# Altium integrated library Altium_Fuse.IntLib: 39 symbols
Pins are listed as number, name and electrical type; pins without a type are passive.

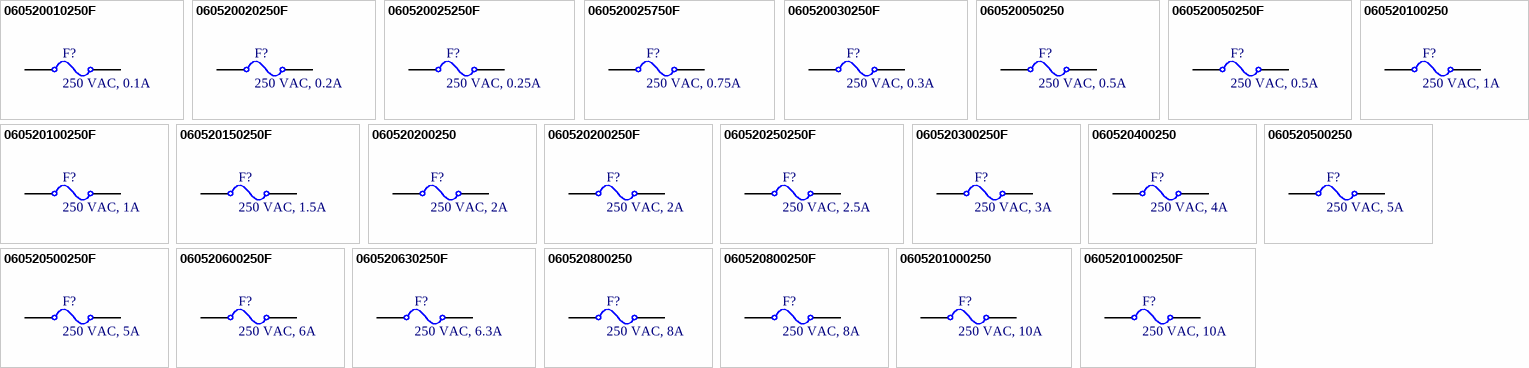
[diagram p0: symbols 060520010250F to 0605201000250F]

## 060520010250F
designator F?, comment 250 VAC, 0.1A
Glass Fuse, Size 0520, 250 VAC, 0.1A, F; Manufacturer: Bel Fuse; Threshold Voltage: 250VAC; Threshold Current: 35A ( 250VAC); Supply 1 Name: Mouser; Supply 1 SN: 530-5ST100-R; Supply 2 Name: Digikey; Supply 2 SN: 507-1238-ND; Supply 3 Name: Thegioiic; Hold Current: 0.1A; Size: 0520; Mounting Technology: Holder / Clip; Fuse speed: F; ComponentLink1Description: Datasheet link; ComponentLink1URL: https://www.belfuse.com/resources/datasheets/circuitprotection/ds-cp-5st-5stp-series.pdf; ComponentLink2Description: Supply 1 URL; ComponentLink2URL: https://www.mouser.vn/ProductDetail/Bel-Fuse/5ST-100-R?qs=MvPYbBWWJysvyCTUIgtvFw%3D%3D; ComponentLink3Description: Supply 2 URL; ComponentLink3URL: https://www.digikey.com/en/products/detail/bel-fuse-inc/5ST-100-R/1009010; ComponentLink4Description: Supply 3 URL; ComponentLink4URL: https://www.thegioiic.com/cau-chi-ong-thuy-tinh-0-1a-5x20mm-toc-do-f; Supply 3 SN: N/A
footprint Fuse_Clip_0520 (Clip Fuse, Size 0520)
pins: 0, 1

## 060520020250F
designator F?, comment 250 VAC, 0.2A
Glass Fuse, Size 0520, 250 VAC, 0.2A, F; Manufacturer: Littelfuse; Threshold Voltage: 250VAC; Threshold Current: 35A ( 250VAC); Supply 1 Name: Mouser; Supply 1 SN: 576-0217.200MXP; Supply 2 Name: Digikey; Supply 2 SN: 507-1263-ND; Supply 3 Name: Thegioiic; Hold Current: 0.2A; Size: 0520; Mounting Technology: Holder / Clip; Fuse speed: F; ComponentLink1Description: Datasheet link; ComponentLink1URL: https://www.littelfuse.com/~/media/electronics/datasheets/fuses/littelfuse_fuse_217_datasheet.pdf.pdf; ComponentLink2Description: Supply 1 URL; ComponentLink2URL: https://www.mouser.vn/ProductDetail/Littelfuse/0217.200MXP?qs=LpXnx4WbYtByvcMiHPFRdQ%3D%3D; ComponentLink3Description: Supply 2 URL; ComponentLink3URL: https://www.digikey.com/en/products/detail/bel-fuse-inc/5MF-1-5-R/1009035; ComponentLink4Description: Supply 3 URL; ComponentLink4URL: https://www.thegioiic.com/cau-chi-ong-thuy-tinh-0-2a-5x20mm-toc-do-f; Supply 3 SN: N/A
footprint Fuse_Clip_0520 (Clip Fuse, Size 0520)
pins: 0, 1

## 060520025250F
designator F?, comment 250 VAC, 0.25A
Glass Fuse, Size 0520, 250 VAC, 0.25A, F; Manufacturer: Littelfuse; Threshold Voltage: 250VAC; Threshold Current: 35A ( 250VAC); Supply 1 Name: Mouser; Supply 1 SN: 576-0217.250MXP; Supply 2 Name: Digikey; Supply 2 SN: F1718-ND; Supply 3 Name: Thegioiic; Hold Current: 0.25A; Size: 0520; Mounting Technology: Holder / Clip; Fuse speed: F; ComponentLink1Description: Datasheet link; ComponentLink1URL: https://www.littelfuse.com/~/media/electronics/datasheets/fuses/littelfuse_fuse_217_datasheet.pdf.pdf; ComponentLink2Description: Supply 1 URL; ComponentLink2URL: https://www.mouser.vn/ProductDetail/Littelfuse/0217.250MXP?qs=KOeOmFnJLTo%252BGMWHwtjXYA%3D%3D; ComponentLink3Description: Supply 2 URL; ComponentLink3URL: https://www.digikey.com/en/products/detail/littelfuse-inc/0217-250MXP/777531?s=N4IgTCBcDaIAxgIwHYB0YCscCyANACiALoC%2BQA; ComponentLink4Description: Supply 3 URL; ComponentLink4URL: https://www.thegioiic.com/cau-chi-ong-thuy-tinh-0-25a-5x20mm-toc-do-f; Supply 3 SN: N/A
footprint Fuse_Clip_0520 (Clip Fuse, Size 0520)
pins: 0, 1

## 060520025750F
designator F?, comment 250 VAC, 0.75A
Glass Fuse, Size 0520, 250 VAC, 0.75A, F; Manufacturer: Bussmann / Eaton; Threshold Voltage: 250VAC; Threshold Current: 35A; Supply 1 Name: Mouser; Supply 1 SN: 504-BK/GMA-750-R; Supply 2 Name: Digikey; Supply 2 SN: 283-2869-ND; Supply 3 Name: Thegioiic; Hold Current: 0.75A; Size: 0520; Mounting Technology: Holder / Clip; Fuse speed: F; ComponentLink1Description: Datasheet link; ComponentLink1URL: https://www.eaton.com/content/dam/eaton/products/electronic-components/resources/data-sheet/eaton-gma-time-delay-glass-tube-fuses-data-sheet.pdf; ComponentLink2Description: Supply 1 URL; ComponentLink2URL: https://www.mouser.vn/ProductDetail/Bussmann-Eaton/BK-GMA-750-R?qs=St27ATL478tI49%252BCTEEZkw%3D%3D; ComponentLink3Description: Supply 2 URL; ComponentLink3URL: https://www.digikey.com/en/products/detail/eaton-electronics-division/BK-GMA-750-R/1023987?s=N4IgTCBcDaIAQCEDSB6A4gWQIIFoDsArAAw4BKIAugL5A; ComponentLink4Description: Supply 3 URL; ComponentLink4URL: https://www.thegioiic.com/cau-chi-ong-thuy-tinh-0-75a-5x20mm-toc-do-f; Supply 3 SN: N/A
footprint Fuse_Clip_0520 (Clip Fuse, Size 0520)
pins: 0, 1

## 060520030250F
designator F?, comment 250 VAC, 0.3A
Glass Fuse, Size 0520, 250 VAC, 0.3A, F; Manufacturer: Littelfuse; Threshold Voltage: 250VAC; Threshold Current: 10kA ( 125VAC); Supply 1 Name: Mouser; Supply 1 SN: 576-0235.300MXP; Supply 2 Name: Digikey; Supply 2 SN: F4717-ND; Supply 3 Name: Thegioiic; Hold Current: 0.3A; Size: 0520; Mounting Technology: Holder / Clip; Fuse speed: F; ComponentLink1Description: Datasheet link; ComponentLink1URL: https://www.littelfuse.com/~/media/electronics/datasheets/fuses/littelfuse_fuse_217_datasheet.pdf.pdf; ComponentLink2Description: Supply 1 URL; ComponentLink2URL: https://www.mouser.vn/ProductDetail/Littelfuse/0235.300MXP?qs=qI%252BDxnNls1%2FlgYUhjxKUBg%3D%3D; ComponentLink3Description: Supply 2 URL; ComponentLink3URL: https://www.digikey.com/en/products/detail/littelfuse-inc/0235-300MXP/778120?s=N4IgTCBcDaIAxgMwFYB0i5wLIA0AKIAugL5A; ComponentLink4Description: Supply 3 URL; ComponentLink4URL: https://www.thegioiic.com/cau-chi-ong-thuy-tinh-0-3a-5x20mm-toc-do-f; Supply 3 SN: N/A
footprint Fuse_Clip_0520 (Clip Fuse, Size 0520)
pins: 0, 1

## 060520050250
designator F?, comment 250 VAC, 0.5A
Ceramic Fuse, Size 0520, 250 VAC, 0.5A; Manufacturer: Littelfuse; Threshold Voltage: 250VAC; Threshold Current: 1,5kA (250VAC); Supply 1 Name: Mouser; Supply 1 SN: 576-0215.500MXP; Supply 2 Name: Digikey; Supply 2 SN: F3597-ND; Supply 3 Name: Thegioiic; Hold Current: 0.5A; Size: 0520; Mounting Technology: Holder / Clip; ComponentLink1Description: Datasheet link; ComponentLink1URL: https://www.littelfuse.com/~/media/electronics/datasheets/fuses/littelfuse_fuse_217_datasheet.pdf.pdf; ComponentLink2Description: Supply 1 URL; ComponentLink2URL: https://www.mouser.vn/ProductDetail/Littelfuse/0215.500MXP?qs=qI%252BDxnNls1%2Fdlp%2FQaMILDA%3D%3D; ComponentLink3Description: Supply 2 URL; ComponentLink3URL: https://www.digikey.com/en/products/detail/littelfuse-inc/0215-500MXP/777422?s=N4IgTCBcDaIAxgIwFYB0y5wLIA0AKIAugL5A; ComponentLink4Description: Supply 3 URL; ComponentLink4URL: https://www.thegioiic.com/cau-chi-su-0-5a-5x20mm; Supply 3 SN: N/A
footprint Fuse_Clip_0520 (Clip Fuse, Size 0520)
pins: 0, 1

## 060520050250F
designator F?, comment 250 VAC, 0.5A
Glass Fuse, Size 0520, 250 VAC, 0.5A, F; Manufacturer: Littelfuse; Threshold Voltage: 250VAC; Threshold Current: 35A (250VAC); Supply 1 Name: Mouser; Supply 1 SN: 576-0217.500HXP; Supply 2 Name: Digikey; Supply 2 SN: F2389-ND; Supply 3 Name: Thegioiic; Hold Current: 0.5A; Size: 0520; Mounting Technology: Holder / Clip; Fuse speed: F; ComponentLink1Description: Datasheet link; ComponentLink1URL: https://www.littelfuse.com/~/media/electronics/datasheets/fuses/littelfuse_fuse_217_datasheet.pdf.pdf; ComponentLink2Description: Supply 1 URL; ComponentLink2URL: https://www.mouser.vn/ProductDetail/Littelfuse/0217.500HXP?qs=LpXnx4WbYtBiNp2qBalYRA%3D%3D; ComponentLink3Description: Supply 2 URL; ComponentLink3URL: https://www.digikey.com/en/products/detail/littelfuse-inc/0217-500HXP/777105?s=N4IgTCBcDaIAxgIwHYB0BWOcASANACiALoC%2BQA; ComponentLink4Description: Supply 3 URL; ComponentLink4URL: https://www.thegioiic.com/cau-chi-ong-thuy-tinh-0-5a-5x20mm-toc-do-f; Supply 3 SN: N/A
footprint Fuse_Clip_0520 (Clip Fuse, Size 0520)
pins: 0, 1

## 060520100250
designator F?, comment 250 VAC, 1A
Ceramic Fuse, Size 0520, 250 VAC, 1A; Manufacturer: Littelfuse; Threshold Voltage: 250VAC; Threshold Current: 1.5kA (250VAC); Supply 1 Name: Mouser; Supply 1 SN: 576-0215001.MXP; Supply 2 Name: Digikey; Supply 2 SN: F1696-ND; Supply 3 Name: Thegioiic; Hold Current: 1A; Size: 0520; Mounting Technology: Holder / Clip; ComponentLink1Description: Datasheet link; ComponentLink1URL: https://www.littelfuse.com/~/media/electronics/datasheets/fuses/littelfuse_fuse_234_datasheet.pdf.pdf; ComponentLink2Description: Supply 1 URL; ComponentLink2URL: https://www.mouser.vn/ProductDetail/Littelfuse/0215001.MXP?qs=ar9f0rk5DXA%2FCWd1HPfSGA%3D%3D; ComponentLink3Description: Supply 2 URL; ComponentLink3URL: https://www.digikey.com/en/products/detail/littelfuse-inc/0215001-MXP/777431?s=N4IgTCBcDaIAxgIwFY50QOgLIA0AKIAugL5A; ComponentLink4Description: Supply 3 URL; ComponentLink4URL: https://www.thegioiic.com/cau-chi-su-1a-5x20mm; Supply 3 SN: N/A
footprint Fuse_Clip_0520 (Clip Fuse, Size 0520)
pins: 0, 1

## 060520100250F
designator F?, comment 250 VAC, 1A
Glass Fuse, Size 0520, 250 VAC, 1A, F; Manufacturer: Littelfuse; Threshold Voltage: 250VAC; Threshold Current: 35A (250VAC); Supply 1 Name: Mouser; Supply 1 SN: 576-0217001.MXP; Supply 2 Name: Digikey; Supply 2 SN: F5929-ND; Supply 3 Name: Thegioiic; Hold Current: 1A; Size: 0520; Mounting Technology: Holder / Clip; Fuse speed: F; ComponentLink1Description: Datasheet link; ComponentLink1URL: https://www.littelfuse.com/~/media/electronics/datasheets/fuses/littelfuse_fuse_234_datasheet.pdf.pdf; ComponentLink2Description: Supply 1 URL; ComponentLink2URL: https://www.mouser.vn/ProductDetail/Littelfuse/0217001.MXP?qs=8QfiMw8FY5O6uJ5P97zz7g%3D%3D; ComponentLink3Description: Supply 2 URL; ComponentLink3URL: https://www.digikey.com/en/products/detail/littelfuse-inc/0217001-MXP/777543?s=N4IgTCBcDaIAQAYwEYDsCHIHQFkAaACiALoC%2BQA; ComponentLink4Description: Supply 3 URL; ComponentLink4URL: https://www.thegioiic.com/cau-chi-ong-thuy-tinh-1a-5x20mm-toc-do-f; Supply 3 SN: N/A
footprint Fuse_Clip_0520 (Clip Fuse, Size 0520)
pins: 0, 1

## 060520150250F
designator F?, comment 250 VAC, 1.5A
Glass Fuse, Size 0520, 250 VAC, 1.5A, F; Manufacturer: Bel Fuse; Threshold Voltage: 250VAC; Threshold Current: 10kA ( 125VAC); Supply 1 Name: Mouser; Supply 1 SN: 576-0235.300MXP; Supply 2 Name: Digikey; Supply 2 SN: F4717-ND; Supply 3 Name: Thegioiic; Hold Current: 1.5A; Size: 0520; Mounting Technology: Holder / Clip; Fuse speed: F; ComponentLink1Description: Datasheet link; ComponentLink1URL: https://www.belfuse.com/resources/datasheets/circuitprotection/ds-cp-5mf-5mfp-series.pdf; ComponentLink2Description: Supply 1 URL; ComponentLink2URL: https://www.mouser.vn/ProductDetail/Bel-Fuse/5MF-1.5-R?qs=MvPYbBWWJytyVTk9PnzKGA%3D%3D; ComponentLink3Description: Supply 2 URL; ComponentLink3URL: https://www.digikey.com/en/products/detail/bel-fuse-inc/5MF-1-5-R/1009035; ComponentLink4Description: Supply 3 URL; ComponentLink4URL: https://www.thegioiic.com/cau-chi-ong-thuy-tinh-1-5a-5x20mm-toc-do-f; Supply 3 SN: N/A
footprint Fuse_Clip_0520 (Clip Fuse, Size 0520)
pins: 0, 1

## 060520200250
designator F?, comment 250 VAC, 2A
Ceramic Fuse, Size 0520, 250 VAC, 2A; Manufacturer: Littelfuse; Threshold Voltage: 250VAC; Threshold Current: 1.5kA (250VAC); Supply 1 Name: Mouser; Supply 1 SN: 576-0215002.HXP; Supply 2 Name: Digikey; Supply 2 SN: F2662-ND; Supply 3 Name: Thegioiic; Hold Current: 2A; Size: 0520; Mounting Technology: Holder / Clip; ComponentLink1Description: Datasheet link; ComponentLink1URL: https://www.littelfuse.com/~/media/electronics/datasheets/fuses/littelfuse_fuse_234_datasheet.pdf.pdf; ComponentLink2Description: Supply 1 URL; ComponentLink2URL: https://www.mouser.vn/ProductDetail/Littelfuse/0215002.HXP?qs=KOeOmFnJLTqrn80%2F88U61A%3D%3D; ComponentLink3Description: Supply 2 URL; ComponentLink3URL: https://www.digikey.com/en/products/detail/littelfuse-inc/0215002-HXP/777432?s=N4IgTCBcDaIAxgIwFY4IHQAkAaAFEAugL5A; ComponentLink4Description: Supply 3 URL; ComponentLink4URL: https://www.thegioiic.com/cau-chi-su-2a-5x20mm; Supply 3 SN: N/A
footprint Fuse_Clip_0520 (Clip Fuse, Size 0520)
pins: 0, 1

## 060520200250F
designator F?, comment 250 VAC, 2A
Glass Fuse, Size 0520, 250 VAC, 2A, F; Manufacturer: Littelfuse; Threshold Voltage: 250VAC; Threshold Current: 35A (250VAC); Supply 1 Name: Mouser; Supply 1 SN: 576-0217002.MXP; Supply 2 Name: Digikey; Supply 2 SN: F1723-ND; Supply 3 Name: Thegioiic; Hold Current: 2A; Size: 0520; Mounting Technology: Holder / Clip; Fuse speed: F; ComponentLink1Description: Datasheet link; ComponentLink1URL: https://www.littelfuse.com/~/media/electronics/datasheets/fuses/littelfuse_fuse_234_datasheet.pdf.pdf; ComponentLink2Description: Supply 1 URL; ComponentLink2URL: https://www.mouser.vn/ProductDetail/Littelfuse/0217002.MXP?qs=YKoktUZms5IWTPy42qy8YA%3D%3D; ComponentLink3Description: Supply 2 URL; ComponentLink3URL: https://www.digikey.com/en/products/detail/littelfuse-inc/0217002-MXP/777545?s=N4IgTCBcDaIAQAYwEYDsCkDoCyANACiALoC%2BQA; ComponentLink4Description: Supply 3 URL; ComponentLink4URL: https://www.thegioiic.com/cau-chi-ong-thuy-tinh-2a-5x20mm-toc-do-f; Supply 3 SN: N/A
footprint Fuse_Clip_0520 (Clip Fuse, Size 0520)
pins: 0, 1

## 060520250250F
designator F?, comment 250 VAC, 2.5A
Glass Fuse, Size 0520, 250 VAC, 2.5A, F; Manufacturer: Littelfuse; Threshold Voltage: 250VAC; Threshold Current: 35A (250VAC); Supply 1 Name: Mouser; Supply 1 SN: 576-021702.5TXP; Supply 2 Name: Digikey; Supply 2 SN: F4260-ND; Supply 3 Name: Thegioiic; Hold Current: 2.5A; Size: 0520; Mounting Technology: Holder / Clip; Fuse speed: F; ComponentLink1Description: Datasheet link; ComponentLink1URL: https://www.littelfuse.com/~/media/electronics/datasheets/fuses/littelfuse_fuse_234_datasheet.pdf.pdf; ComponentLink2Description: Supply 1 URL; ComponentLink2URL: https://www.mouser.vn/ProductDetail/Littelfuse/021702.5TXP?qs=Co4VkB5J4%2FtlATVasM8PdQ%3D%3D; ComponentLink3Description: Supply 2 URL; ComponentLink3URL: https://www.digikey.com/en/products/detail/littelfuse-inc/021702-5TXP/3305622?s=N4IgTCBcDaIAxgIwHYEDoCsAVAGgBRAF0BfIA; ComponentLink4Description: Supply 3 URL; ComponentLink4URL: https://www.thegioiic.com/cau-chi-ong-thuy-tinh-2-5a-5x20mm-toc-do-f; Supply 3 SN: N/A
footprint Fuse_Clip_0520 (Clip Fuse, Size 0520)
pins: 0, 1

## 060520300250F
designator F?, comment 250 VAC, 3A
Glass Fuse, Size 0520, 250 VAC, 3A, F; Manufacturer: Littelfuse; Threshold Voltage: 250VAC; Threshold Current: 10kA (125VAC); Supply 1 Name: Mouser; Supply 1 SN: 576-0235003.HXP; Supply 2 Name: Digikey; Supply 2 SN: F2682-ND; Supply 3 Name: Thegioiic; Hold Current: 3A; Size: 0520; Mounting Technology: Holder / Clip; Fuse speed: F; ComponentLink1Description: Datasheet link; ComponentLink1URL: https://www.littelfuse.com/~/media/electronics/datasheets/fuses/littelfuse_fuse_234_datasheet.pdf.pdf; ComponentLink2Description: Supply 1 URL; ComponentLink2URL: https://www.mouser.vn/ProductDetail/Littelfuse/0235003.HXP?qs=WtG364jHAdx3buZ4LbEsmg%3D%3D; ComponentLink3Description: Supply 2 URL; ComponentLink3URL: https://www.digikey.com/en/products/detail/littelfuse-inc/0235003-HXP/778150?s=N4IgTCBcDaIAxgMwFY50QOgBIA0AKIAugL5A; ComponentLink4Description: Supply 3 URL; ComponentLink4URL: https://www.thegioiic.com/cau-chi-ong-thuy-tinh-3a-5x20mm-toc-do-f; Supply 3 SN: N/A
footprint Fuse_Clip_0520 (Clip Fuse, Size 0520)
pins: 0, 1

## 060520400250
designator F?, comment 250 VAC, 4A
Ceramic Fuse, Size 0520, 250 VAC, 4A; Manufacturer: Littelfuse; Threshold Voltage: 250VAC; Threshold Current: 1.5 kA (250VAC); Supply 1 Name: Mouser; Supply 1 SN: 576-0215004.MXP; Supply 2 Name: Digikey; Supply 2 SN: F1697-ND; Supply 3 Name: Thegioiic; Hold Current: 4A; Size: 0520; Mounting Technology: Holder / Clip; ComponentLink1Description: Datasheet link; ComponentLink1URL: https://www.littelfuse.com/media?resourcetype=datasheets&itemid=a0d11841-302e-49a3-9086-a6d43e30edf0&filename=littelfuse-fuse-215-datasheet; ComponentLink2Description: Supply 1 URL; ComponentLink2URL: https://www.mouser.vn/ProductDetail/Littelfuse/0215004.MXP?qs=bpnLQM2ZShyhLPqerLPL3g%3D%3D; ComponentLink3Description: Supply 2 URL; ComponentLink3URL: https://www.digikey.com/en/products/detail/littelfuse-inc/0215004-MXP/777437?s=N4IgTCBcDaIAxgIwFY5wCwDoCyANACiALoC%2BQA; ComponentLink4Description: Supply 3 URL; ComponentLink4URL: https://www.thegioiic.com/cau-chi-su-4a-5x20mm; Supply 3 SN: N/A
footprint Fuse_Clip_0520 (Clip Fuse, Size 0520)
pins: 0, 1

## 060520500250
designator F?, comment 250 VAC, 5A
Ceramic Fuse, Size 0520, 250 VAC, 5A; Manufacturer: Littelfuse; Threshold Voltage: 250VAC; Threshold Current: 1.5kA (250VAC); Supply 1 Name: Mouser; Supply 1 SN: 576-0215005.HXP; Supply 2 Name: Digikey; Supply 2 SN: F2666-ND; Supply 3 Name: Thegioiic; Hold Current: 5A; Size: 0520; Mounting Technology: Holder / Clip; ComponentLink1Description: Datasheet link; ComponentLink1URL: https://www.littelfuse.com/~/media/electronics/datasheets/fuses/littelfuse_fuse_234_datasheet.pdf.pdf; ComponentLink2Description: Supply 1 URL; ComponentLink2URL: https://www.mouser.vn/ProductDetail/Littelfuse/0215005.HXP?qs=rkYlxpo0zrFldKFCO%252BlKVQ%3D%3D; ComponentLink3Description: Supply 2 URL; ComponentLink3URL: https://www.digikey.com/en/products/detail/littelfuse-inc/0215005-HXP/777438?s=N4IgTCBcDaIAxgIwFY52QOgBIA0AKIAugL5A; ComponentLink4Description: Supply 3 URL; ComponentLink4URL: https://www.thegioiic.com/cau-chi-su-5a-5x20mm; Supply 3 SN: N/A
footprint Fuse_Clip_0520 (Clip Fuse, Size 0520)
pins: 0, 1

## 060520500250F
designator F?, comment 250 VAC, 5A
Glass Fuse, Size 0520, 250 VAC, 5A, F; Manufacturer: Littelfuse; Threshold Voltage: 250VAC; Threshold Current: 50A (125VAC); Supply 1 Name: Mouser; Supply 1 SN: 576-0217005.MXP; Supply 2 Name: Digikey; Supply 2 SN: F1725-ND; Supply 3 Name: Thegioiic; Hold Current: 5A; Size: 0520; Mounting Technology: Holder / Clip; Fuse speed: F; ComponentLink1Description: Datasheet link; ComponentLink1URL: https://www.littelfuse.com/~/media/electronics/datasheets/fuses/littelfuse_fuse_234_datasheet.pdf.pdf; ComponentLink2Description: Supply 1 URL; ComponentLink2URL: https://www.mouser.vn/ProductDetail/Littelfuse/0217005.MXP?qs=8QfiMw8FY5N%2FZH431hpxSA%3D%3D; ComponentLink3Description: Supply 2 URL; ComponentLink3URL: https://www.digikey.com/en/products/detail/littelfuse-inc/0217005-MXP/777549?s=N4IgTCBcDaIAQAYwEYDsCEFYB0BZAGgAogC6AvkA; ComponentLink4Description: Supply 3 URL; ComponentLink4URL: https://www.thegioiic.com/cau-chi-ong-thuy-tinh-5a-5x20mm-toc-do-f; Supply 3 SN: N/A
footprint Fuse_Clip_0520 (Clip Fuse, Size 0520)
pins: 0, 1

## 060520600250F
designator F?, comment 250 VAC, 6A
Glass Fuse, Size 0520, 250 VAC, 6A, F; Manufacturer: Littelfuse; Threshold Voltage: 250VAC; Threshold Current: 10kA (125VAC); Supply 1 Name: Mouser; Supply 1 SN: 576-0234006.MXP; Supply 2 Name: Digikey; Supply 2 SN: F2694-ND; Supply 3 Name: Thegioiic; Hold Current: 6A; Size: 0520; Mounting Technology: Holder / Clip; Fuse speed: F; ComponentLink1Description: Datasheet link; ComponentLink1URL: https://www.littelfuse.com/~/media/electronics/datasheets/fuses/littelfuse_fuse_234_datasheet.pdf.pdf; ComponentLink2Description: Supply 1 URL; ComponentLink2URL: https://www.mouser.vn/ProductDetail/Littelfuse/0234006.MXP?qs=YKoktUZms5InNPE1Qna0Cg%3D%3D; ComponentLink3Description: Supply 2 URL; ComponentLink3URL: https://www.digikey.com/en/products/detail/littelfuse-inc/0234006-MXP/778084; ComponentLink4Description: Supply 3 URL; ComponentLink4URL: https://www.thegioiic.com/cau-chi-ong-thuy-tinh-6a-5x20mm-toc-do-f; Supply 3 SN: N/A
footprint Fuse_Clip_0520 (Clip Fuse, Size 0520)
pins: 0, 1

## 060520630250F
designator F?, comment 250 VAC, 6.3A
Glass Fuse, Size 0520, 250 VAC, 6.3A, F; Manufacturer: Littelfuse; Threshold Voltage: 250VAC; Threshold Current: 63A (250VAC); Supply 1 Name: Mouser; Supply 1 SN: 576-021706.3VXP; Supply 2 Name: Digikey; Supply 2 SN: F11027-ND; Supply 3 Name: Thegioiic; Hold Current: 6.3A; Size: 0520; Mounting Technology: Holder / Clip; Fuse speed: F; ComponentLink1Description: Datasheet link; ComponentLink1URL: https://www.littelfuse.com/~/media/electronics/datasheets/fuses/littelfuse_fuse_234_datasheet.pdf.pdf; ComponentLink2Description: Supply 1 URL; ComponentLink2URL: https://www.mouser.vn/ProductDetail/Littelfuse/021706.3VXP?qs=Vv6sT79n3zQZ1wGK5TThFg%3D%3D; ComponentLink3Description: Supply 2 URL; ComponentLink3URL: https://www.digikey.com/en/products/detail/littelfuse-inc/021706-3VXP/3424969?s=N4IgTCBcDaIAxgIwHY4DYB0BmAagDQAUQBdAXyA; ComponentLink4Description: Supply 3 URL; ComponentLink4URL: https://www.thegioiic.com/cau-chi-ong-thuy-tinh-6-3a-5x20mm-toc-do-f; Supply 3 SN: N/A
footprint Fuse_Clip_0520 (Clip Fuse, Size 0520)
pins: 0, 1

## 060520800250
designator F?, comment 250 VAC, 8A
Ceramic Fuse, Size 0520, 250 VAC, 8A; Manufacturer: Littelfuse; Threshold Voltage: 250VAC; Threshold Current: 1.5kA (250VAC); Supply 1 Name: Mouser; Supply 1 SN: 576-0215008.MXP; Supply 2 Name: Digikey; Supply 2 SN: F4613-ND; Supply 3 Name: Thegioiic; Hold Current: 8A; Size: 0520; Mounting Technology: Holder / Clip; ComponentLink1Description: Datasheet link; ComponentLink1URL: https://www.littelfuse.com/~/media/electronics/datasheets/fuses/littelfuse_fuse_234_datasheet.pdf.pdf; ComponentLink2Description: Supply 1 URL; ComponentLink2URL: https://www.mouser.vn/ProductDetail/Littelfuse/0215008.MXP?qs=qI%252BDxnNls18xZY24y8bA3A%3D%3D; ComponentLink3Description: Supply 2 URL; ComponentLink3URL: https://www.digikey.com/en/products/detail/littelfuse-inc/0215008-MXP/777443?s=N4IgTCBcDaIAQAYwEYCsCEA4B0BZAGgAogC6AvkA; ComponentLink4Description: Supply 3 URL; ComponentLink4URL: https://www.thegioiic.com/cau-chi-su-8a-5x20mm; Supply 3 SN: N/A
footprint Fuse_Clip_0520 (Clip Fuse, Size 0520)
pins: 0, 1

## 060520800250F
designator F?, comment 250 VAC, 8A
Glass Fuse, Size 0520, 250 VAC, 8A, F; Manufacturer: Littelfuse; Threshold Voltage: 250VAC; Threshold Current: 80A (125VAC); Supply 1 Name: Mouser; Supply 1 SN: 576-0217008.MXP; Supply 2 Name: Digikey; Supply 2 SN: F4635-ND; Supply 3 Name: Thegioiic; Hold Current: 8A; Size: 0520; Mounting Technology: Holder / Clip; Fuse speed: F; ComponentLink1Description: Datasheet link; ComponentLink1URL: https://www.littelfuse.com/~/media/electronics/datasheets/fuses/littelfuse_fuse_234_datasheet.pdf.pdf; ComponentLink2Description: Supply 1 URL; ComponentLink2URL: https://www.mouser.vn/ProductDetail/Littelfuse/0217008.MXP?qs=8QfiMw8FY5N6Hjj4UqrSQw%3D%3D; ComponentLink3Description: Supply 2 URL; ComponentLink3URL: https://www.digikey.com/en/products/detail/littelfuse-inc/0217008-MXP/777551?s=N4IgTCBcDaIAxgIwHY5wBwDoCyANACiALoC%2BQA; ComponentLink4Description: Supply 3 URL; ComponentLink4URL: https://www.thegioiic.com/cau-chi-ong-thuy-tinh-8a-5x20mm-toc-do-f; Supply 3 SN: N/A
footprint Fuse_Clip_0520 (Clip Fuse, Size 0520)
pins: 0, 1

## 0605201000250
designator F?, comment 250 VAC, 10A
Ceramic Fuse, Size 0520, 250 VAC, 10A; Manufacturer: Littelfuse; Threshold Voltage: 250VAC; Threshold Current: 1.5kA (250VAC); Supply 1 Name: Mouser; Supply 1 SN: 576-0215010.MXP; Supply 2 Name: Digikey; Supply 2 SN: F1699-ND; Supply 3 Name: Thegioiic; Hold Current: 10A; Size: 0520; Mounting Technology: Holder / Clip; ComponentLink1Description: Datasheet link; ComponentLink1URL: https://www.littelfuse.com/~/media/electronics/datasheets/fuses/littelfuse_fuse_234_datasheet.pdf.pdf; ComponentLink2Description: Supply 1 URL; ComponentLink2URL: https://www.mouser.vn/ProductDetail/Littelfuse/0215010.MXP?qs=qI%252BDxnNls1%252BmXG81o%252BQ0mA%3D%3D; ComponentLink3Description: Supply 2 URL; ComponentLink3URL: https://www.digikey.com/en/products/detail/littelfuse-inc/0215010-MXP/777449; ComponentLink4Description: Supply 3 URL; ComponentLink4URL: https://www.thegioiic.com/cau-chi-su-10a-5x20mm; Supply 3 SN: N/A
footprint Fuse_Clip_0520 (Clip Fuse, Size 0520)
pins: 0, 1

## 0605201000250F
designator F?, comment 250 VAC, 10A
Glass Fuse, Size 0520, 250 VAC, 10A, F; Manufacturer: Littelfuse; Threshold Voltage: 250VAC; Threshold Current: 100A (125VAC); Supply 1 Name: Mouser; Supply 1 SN: 576-0218010.HXP; Supply 2 Name: Digikey; Supply 2 SN: F2425-ND; Supply 3 Name: Thegioiic; Hold Current: 10A; Size: 0520; Mounting Technology: Holder / Clip; Fuse speed: F; ComponentLink1Description: Datasheet link; ComponentLink1URL: https://www.littelfuse.com/~/media/electronics/datasheets/fuses/littelfuse_fuse_234_datasheet.pdf.pdf; ComponentLink2Description: Supply 1 URL; ComponentLink2URL: https://www.mouser.vn/ProductDetail/Littelfuse/0218010.HXP?qs=YKoktUZms5K5aEWQkceb8A%3D%3D; ComponentLink3Description: Supply 2 URL; ComponentLink3URL: https://www.digikey.com/en/products/detail/littelfuse-inc/0218010-HXP/777141?s=N4IgTCBcDaIAxgIwA46LgOgBIA0AKIAugL5A; ComponentLink4Description: Supply 3 URL; ComponentLink4URL: https://www.thegioiic.com/cau-chi-ong-thuy-tinh-10a-5x20mm-toc-do-f; Supply 3 SN: N/A
footprint Fuse_Clip_0520 (Clip Fuse, Size 0520)
pins: 0, 1


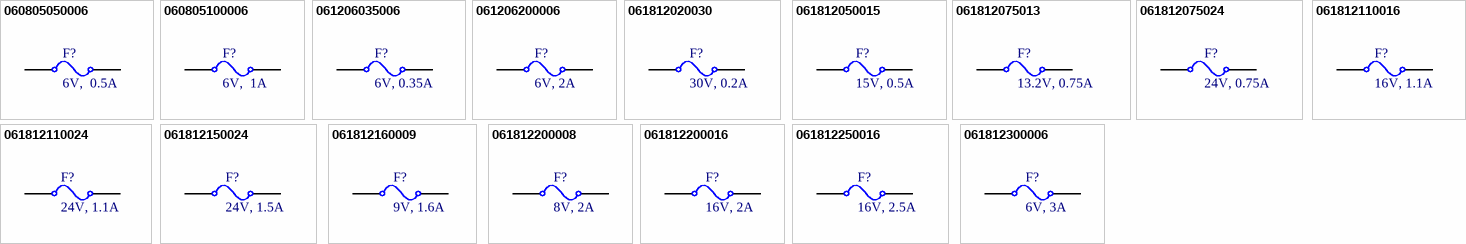
[diagram p1: symbols 060805050006 to 061812300006]

## 060805050006
designator F?, comment 6V,  0.5A
Resettable Fuse, Size 0805, 6V, 0.5A; Manufacturer: Littelfuse; Threshold Current: 100A; Trip Current: 1A; Supply 1 Name: Mouser; Supply 1 SN: 576-0805L050; Supply 2 Name: Digikey; Supply 2 SN: F2772TR-ND; Supply 3 Name: Thegioiic; Supply 3 SN: 0805L050WR; Threshold Voltage: 6V; Hold Current: 0.5A; Size: 0805; Mounting Technology: SMT/SMD; ComponentLink1Description: Datasheet link; ComponentLink1URL: https://www.littelfuse.com/~/media/electronics/datasheets/resettable_ptcs/littelfuse_ptc_0805l_datasheet.pdf.pdf; ComponentLink2Description: Supply 1 URL; ComponentLink2URL: https://www.mouser.vn/ProductDetail/Littelfuse/0805L050WR?qs=SJZ%252BTX%252BI2BS1ufZ22HRodg%3D%3D; ComponentLink3Description: Supply 2 URL; ComponentLink3URL: https://www.digikey.com/en/products/detail/littelfuse-inc/0805L050WR/1212822?s=N4IgTCBcDaIAwA44FYAyK4HUBKACEAugL5A; ComponentLink4Description: Supply 3 URL; ComponentLink4URL: https://www.thegioiic.com/0805l050wr-cau-chi-tu-phuc-hoi-0805-6v-500ma
footprint Fuse_SMD_0805 (Fuse SMD, size 0805)
pins: 0, 1

## 060805100006
designator F?, comment 6V,  1A
Resettable Fuse, Size 0805, 6V, 1A; Manufacturer: Littelfuse; Threshold Current: 40A; Trip Current: 1.95A; Supply 1 Name: Mouser; Supply 1 SN: 576-0805L100; Supply 2 Name: Digikey; Supply 2 SN: F2774TR-ND; Supply 3 Name: Thegioiic; Supply 3 SN: 0805L100WR; Threshold Voltage: 6V; Hold Current: 1A; Size: 0805; Mounting Technology: SMT/SMD; ComponentLink1Description: Datasheet link; ComponentLink1URL: https://www.littelfuse.com/~/media/electronics/datasheets/resettable_ptcs/littelfuse_ptc_0805l_datasheet.pdf.pdf; ComponentLink2Description: Supply 1 URL; ComponentLink2URL: https://www.mouser.vn/ProductDetail/Littelfuse/0805L100WR?qs=SJZ%252BTX%252BI2BTMlREVsW49pQ%3D%3D; ComponentLink3Description: Supply 2 URL; ComponentLink3URL: https://www.digikey.com/en/products/detail/littelfuse-inc/0805L100WR/1212824; ComponentLink4Description: Supply 3 URL; ComponentLink4URL: https://www.thegioiic.com/0805l100wr-cau-chi-tu-phuc-hoi-0805-6v-1a
footprint Fuse_SMD_0805 (Fuse SMD, size 0805)
pins: 0, 1

## 061206035006
designator F?, comment 6V, 0.35A
Resettable Fuse, Size 1206, 6V, 0.35A; Manufacturer: Bourns; Threshold Current: 100A; Trip Current: 0.75A; Supply 1 Name: Mouser; Supply 1 SN: 652-MF-NSMF035-2; Supply 2 Name: Digikey; Supply 2 SN: MF-NSMF035-2TR-ND; Supply 3 Name: Thegioiic; Supply 3 SN: MF-NSMF035-2; Threshold Voltage: 6V; Hold Current: 0.35A; Size: 1206; Mounting Technology: SMT/SMD; ComponentLink1Description: Datasheet link; ComponentLink1URL: https://www.bourns.com/docs/Product-Datasheets/mfnsmf.pdf; ComponentLink2Description: Supply 1 URL; ComponentLink2URL: https://www.mouser.vn/ProductDetail/Bourns/MF-NSMF035-2?qs=3eVyCPG4fwnHDrvs%2FGppSw%3D%3D; ComponentLink3Description: Supply 2 URL; ComponentLink3URL: https://www.digikey.com/en/products/detail/bourns-inc/MF-NSMF035-2/1232784?s=N4IgTCBcDaILIDEC0A5AyogDAZgKxIgF0BfIA; ComponentLink4Description: Supply 3 URL; ComponentLink4URL: https://www.thegioiic.com/mf-nsmf035-2-cau-chi-tu-phuc-hoi-1206-6v-0-35a
footprint Fuse_SMD_1206 (Fuse SMD, size 1206)
pins: 0, 1

## 061206200006
designator F?, comment 6V, 2A
Resettable Fuse, Size 1206, 6V, 2A; Manufacturer: Bourns; Threshold Current: 100A; Trip Current: 4A; Supply 1 Name: Mouser; Supply 1 SN: 652-MF-NSMF200-2; Supply 2 Name: Digikey; Supply 2 SN: MF-NSMF200-2TR-ND; Supply 3 Name: Thegioiic; Supply 3 SN: MF-NSMF200-2; Threshold Voltage: 6V; Hold Current: 2A; Size: 1206; Mounting Technology: SMT/SMD; ComponentLink1Description: Datasheet link; ComponentLink1URL: https://www.bourns.com/docs/product-datasheets/mf-nsmf.pdf?sfvrsn=39c76af6_20; ComponentLink2Description: Supply 1 URL; ComponentLink2URL: https://www.mouser.vn/ProductDetail/Bourns/MF-NSMF200-2?qs=49157WxD7wmY0%2FO7FNMvtw%3D%3D; ComponentLink3Description: Supply 2 URL; ComponentLink3URL: https://www.digikey.com/en/products/detail/bourns-inc/mf-nsmf200-2/1232785; ComponentLink4Description: Supply 3 URL; ComponentLink4URL: https://www.thegioiic.com/mf-nsmf200-2-cau-chi-tu-phuc-hoi-1206-6v-2a
footprint Fuse_SMD_1206 (Fuse SMD, size 1206)
pins: 0, 1

## 061812020030
designator F?, comment 30V, 0.2A
Resettable Fuse, Size 1812, 30V, 0.2A; Manufacturer: Bourns; Threshold Current: 80A; Trip Current: 0.4A; Supply 1 Name: Mouser; Supply 1 SN: 652-MF-MSMF020-2; Supply 2 Name: Digikey; Supply 2 SN: MF-MSMF020-2TR-ND; Supply 3 Name: Thegioiic; Supply 3 SN: MF-MSMF020-2; Threshold Voltage: 30V; Hold Current: 0.2A; Size: 1812; Mounting Technology: SMT/SMD; ComponentLink1Description: Datasheet link; ComponentLink1URL: https://www.bourns.com/docs/Product-Datasheets/mfnsmf.pdf; ComponentLink2Description: Supply 1 URL; ComponentLink2URL: https://www.mouser.vn/ProductDetail/Bourns/MF-MSMF020-2?qs=YYkh393lUtjbPn24kFIUNQ%3D%3D; ComponentLink3Description: Supply 2 URL; ComponentLink3URL: https://www.digikey.com/en/products/detail/bourns-inc/MF-MSMF020-2/662814?s=N4IgTCBcDaILIDEC0cDKiAMYNLAAhAF0BfIA; ComponentLink4Description: Supply 3 URL; ComponentLink4URL: https://www.thegioiic.com/mf-msmf020-2-cau-chi-tu-phuc-hoi-1812-0-20a-30v
footprint Fuse_SMD_1812 (Fuse SMD, size 1812)
pins: 0, 1

## 061812050015
designator F?, comment 15V, 0.5A
Resettable Fuse, Size 1812, 15V, 0.5A; Manufacturer: Bourns; Threshold Current: 100A; Trip Current: 1A; Supply 1 Name: Mouser; Supply 1 SN: 652-MF-MSMF050-2; Supply 2 Name: Digikey; Supply 2 SN: MF-MSMF050-2TR-ND; Supply 3 Name: Thegioiic; Supply 3 SN: MF-MSMF050-2; Threshold Voltage: 15V; Hold Current: 0.5A; Size: 1812; Mounting Technology: SMT/SMD; ComponentLink1Description: Datasheet link; ComponentLink1URL: https://www.bourns.com/docs/Product-Datasheets/mfnsmf.pdf; ComponentLink2Description: Supply 1 URL; ComponentLink2URL: https://www.mouser.vn/ProductDetail/Bourns/MF-MSMF050-2?qs=t3shhpq1i1DZ7OBD5kLNoA%3D%3D; ComponentLink3Description: Supply 2 URL; ComponentLink3URL: https://www.digikey.com/en/products/detail/bourns-inc/MF-MSMF050-2/662816?s=N4IgTCBcDaILIDEC0cDKiAMBWDSIF0BfIA; ComponentLink4Description: Supply 3 URL; ComponentLink4URL: https://www.thegioiic.com/mf-msmf050-2-cau-chi-tu-phuc-hoi-1812-15v-0-5a
footprint Fuse_SMD_1812 (Fuse SMD, size 1812)
pins: 0, 1

## 061812075013
designator F?, comment 13.2V, 0.75A
Resettable Fuse, Size 1812, 13.2V, 0.75A; Manufacturer: Littelfuse; Threshold Voltage: 13V; Threshold Current: 100A; Trip Current: 1.5A; Supply 1 Name: Mouser; Supply 1 SN: 650-MINISMDC075F-2; Supply 2 Name: Digikey; Supply 2 SN: MINISMDC075F-2TR-ND; Supply 3 Name: Thegioiic; Supply 3 SN: MINISMDC075F-2; Hold Current: 0.75A; Size: 1812; Mounting Technology: SMT/SMD; ComponentLink1Description: Datasheet link; ComponentLink1URL: https://www.littelfuse.com/~/media/electronics/product_specifications/resettable_ptcs/littelfuse_ptc_minismdc075f_2_product_specification.pdf.pdf; ComponentLink2Description: Supply 1 URL; ComponentLink2URL: https://www.mouser.vn/ProductDetail/Littelfuse/MINISMDC075F-2?qs=k5V78Jg%2Feq6mspvURJRgsw%3D%3D; ComponentLink3Description: Supply 2 URL; ComponentLink3URL: https://www.digikey.com/en/products/detail/littelfuse-inc/MINISMDC075F-2/1045891; ComponentLink4Description: Supply 3 URL; ComponentLink4URL: https://www.thegioiic.com/minismdc075f-2-cau-chi-tu-phuc-hoi-1812-13v-750ma
footprint Fuse_SMD_1812 (Fuse SMD, size 1812)
pins: 0, 1

## 061812075024
designator F?, comment 24V, 0.75A
Resettable Fuse, Size 1812, 24V, 0.75A; Manufacturer: Bourns; Threshold Current: 40A; Trip Current: 1.5A; Supply 1 Name: Mouser; Supply 1 SN: 652-MF-MSMF075/24-2; Supply 2 Name: Digikey; Supply 2 SN: MF-MSMF075/24-2TR-ND; Supply 3 Name: Thegioiic; Supply 3 SN: MF-MSMF075/24-2; Threshold Voltage: 24V; Hold Current: 0.75A; Size: 1812; Mounting Technology: SMT/SMD; ComponentLink1Description: Datasheet link; ComponentLink1URL: https://www.bourns.com/docs/Product-Datasheets/mfnsmf.pdf; ComponentLink2Description: Supply 1 URL; ComponentLink2URL: https://www.mouser.vn/ProductDetail/Bourns/MF-MSMF075-24-2?qs=4wQOTo1SlKkr8xXCy%2FQ4UA%3D%3D; ComponentLink3Description: Supply 2 URL; ComponentLink3URL: https://www.digikey.com/en/products/detail/bourns-inc/MF-MSMF075-24-2/662818?s=N4IgTCBcDaILIDEC0cDKiAMB2ArAejABYkIBdAXyA; ComponentLink4Description: Supply 3 URL; ComponentLink4URL: https://www.thegioiic.com/mf-msmf075-24-2-cau-chi-tu-phuc-hoi-1812-24v-0-75a
footprint Fuse_SMD_1812 (Fuse SMD, size 1812)
pins: 0, 1

## 061812110016
designator F?, comment 16V, 1.1A
Resettable Fuse, Size 1812, 16V, 1.1A; Manufacturer: Bourns; Threshold Current: 100A; Trip Current: 2.2A; Supply 1 Name: Mouser; Supply 1 SN: 652-MF-MSMF110/16-2; Supply 2 Name: Digikey; Supply 2 SN: MF-MSMF110/16-2TR-ND; Supply 3 Name: Thegioiic; Supply 3 SN: MF-MSMF110/16-2; Threshold Voltage: 16V; Hold Current: 1.1A; Size: 1812; Mounting Technology: SMT/SMD; ComponentLink1Description: Datasheet link; ComponentLink1URL: https://www.bourns.com/docs/Product-Datasheets/mfnsmf.pdf; ComponentLink2Description: Supply 1 URL; ComponentLink2URL: https://www.mouser.vn/ProductDetail/Bourns/MF-MSMF110-16-2?qs=wksszfECgvir54ST3ixUHA%3D%3D; ComponentLink3Description: Supply 2 URL; ComponentLink3URL: https://www.digikey.com/en/products/detail/bourns-inc/MF-MSMF110-16-2/662820; ComponentLink4Description: Supply 3 URL; ComponentLink4URL: https://www.thegioiic.com/mf-msmf110-16-2-cau-chi-tu-phuc-hoi-1812-16v-1-1a
footprint Fuse_SMD_1812 (Fuse SMD, size 1812)
pins: 0, 1

## 061812110024
designator F?, comment 24V, 1.1A
Resettable Fuse, Size 1812, 24V, 1.1A; Manufacturer: Bourns; Threshold Current: 20A; Trip Current: 2.2A; Supply 1 Name: Mouser; Supply 1 SN: 652-MF-MSMF110/24X-2; Supply 2 Name: Digikey; Supply 2 SN: MF-MSMF110/24X-2TR-ND; Supply 3 Name: Thegioiic; Supply 3 SN: MF-MSMF110/24X-2; Threshold Voltage: 24V; Hold Current: 1.1A; Size: 1812; Mounting Technology: SMT/SMD; ComponentLink1Description: Datasheet link; ComponentLink1URL: https://www.bourns.com/docs/Product-Datasheets/mfnsmf.pdf; ComponentLink2Description: Supply 1 URL; ComponentLink2URL: https://www.mouser.vn/ProductDetail/Bourns/MF-MSMF110-24X-2?qs=tiksPeNXt0KSvkNsPEvQzw%3D%3D; ComponentLink3Description: Supply 2 URL; ComponentLink3URL: https://www.digikey.com/en/products/detail/bourns-inc/MF-MSMF110-24X-2/2127043?s=N4IgTCBcDaILIDEC0cDKiCMGAMB6MALABpIQC6AvkA; ComponentLink4Description: Supply 3 URL; ComponentLink4URL: https://www.thegioiic.com/mf-msmf110-24x-2-cau-chi-tu-phuc-hoi-1812-24v-1-1a
footprint Fuse_SMD_1812 (Fuse SMD, size 1812)
pins: 0, 1

## 061812150024
designator F?, comment 24V, 1.5A
Resettable Fuse, Size 1812, 24V, 1.5A; Manufacturer: Littelfuse; Threshold Current: 20A; Trip Current: 3A; Supply 1 Name: Mouser; Supply 1 SN: 650-MINISMDC150F/24; Supply 2 Name: Digikey; Supply 2 SN: MINISMDC150F24-2TR-ND; Supply 3 Name: Thegioiic; Threshold Voltage: 24V; Hold Current: 1.5A; Size: 1812; Mounting Technology: SMT/SMD; ComponentLink1Description: Datasheet link; ComponentLink1URL: https://www.littelfuse.com/~/media/electronics/product_specifications/resettable_ptcs/littelfuse_ptc_minismdc300f_2_product_specification.pdf.pdf; ComponentLink2Description: Supply 1 URL; ComponentLink2URL: https://www.mouser.vn/ProductDetail/Littelfuse/MINISMDC150F-24-2?qs=F6FIpiMdEVZ%2Fp37J%2FDHAxA%3D%3D; ComponentLink3Description: Supply 2 URL; ComponentLink3URL: https://www.digikey.com/en/products/detail/littelfuse-inc/MINISMDC150F-24-2/1113513?s=N4IgTCBcDaILIEkByCDKcAiBhAjAVgAYAxAejABYBaCAXQF8g; ComponentLink4Description: Supply 3 URL; ComponentLink4URL: https://www.thegioiic.com/cau-chi-tu-phuc-hoi-1812-24v-1-5a; Supply 3 SN: N/A
footprint Fuse_SMD_1812 (Fuse SMD, size 1812)
pins: 0, 1

## 061812160009
designator F?, comment 9V, 1.6A
Resettable Fuse, Size 1812, 9V, 1.6A; Manufacturer: Littelfuse; Threshold Current: 100A; Trip Current: 3.2A; Supply 1 Name: Mouser; Supply 1 SN: 650-MINISMDC160F-2; Supply 2 Name: Digikey; Supply 2 SN: MINISMDC160F-2TR-ND; Supply 3 Name: Thegioiic; Threshold Voltage: 9V; Hold Current: 1.6A; Size: 1812; Mounting Technology: SMT/SMD; ComponentLink1Description: Datasheet link; ComponentLink1URL: https://www.littelfuse.com/~/media/electronics/product_specifications/resettable_ptcs/littelfuse_ptc_minismdc300f_2_product_specification.pdf.pdf; ComponentLink2Description: Supply 1 URL; ComponentLink2URL: https://www.mouser.vn/ProductDetail/Littelfuse/miniSMDC160F-2?qs=F6FIpiMdEVaTu%252B225tqW3A%3D%3D; ComponentLink3Description: Supply 2 URL; ComponentLink3URL: https://www.digikey.com/en/products/detail/littelfuse-inc/MINISMDC160F-2/1045895?s=N4IgTCBcDaILYEsB2CDKBZAIgYQIwDYAGAMQFoIBdAXyA; ComponentLink4Description: Supply 3 URL; ComponentLink4URL: https://www.thegioiic.com/cau-chi-tu-phuc-hoi-1812-9v-1-6a; Supply 3 SN: N/A
footprint Fuse_SMD_1812 (Fuse SMD, size 1812)
pins: 0, 1

## 061812200008
designator F?, comment 8V, 2A
Resettable Fuse, Size 1812, 8V, 2A; Manufacturer: Littelfuse; Threshold Current: 100A; Trip Current: 4A; Supply 1 Name: Mouser; Supply 1 SN: 650-MINISMDC200F-2; Supply 2 Name: Digikey; Supply 2 SN: MINISMDC200F-2TR-ND; Supply 3 Name: Thegioiic; Threshold Voltage: 8V; Hold Current: 2A; Size: 1812; Mounting Technology: SMT/SMD; ComponentLink1Description: Datasheet link; ComponentLink1URL: https://www.littelfuse.com/~/media/electronics/product_specifications/resettable_ptcs/littelfuse_ptc_minismdc300f_2_product_specification.pdf.pdf; ComponentLink2Description: Supply 1 URL; ComponentLink2URL: https://www.mouser.vn/ProductDetail/Littelfuse/MINISMDC200F-2?qs=F6FIpiMdEVbPu4q%2F42CC1w%3D%3D; ComponentLink3Description: Supply 2 URL; ComponentLink3URL: https://www.digikey.com/en/products/detail/littelfuse-inc/MINISMDC200F-2/1045898?s=N4IgTCBcDaIAQFkCSA5JBlBARAwmADPgGIC0EAugL5A; ComponentLink4Description: Supply 3 URL; ComponentLink4URL: https://www.thegioiic.com/cau-chi-tu-phuc-hoi-1812-8v-2a; Supply 3 SN: N/A
footprint Fuse_SMD_1812 (Fuse SMD, size 1812)
pins: 0, 1

## 061812200016
designator F?, comment 16V, 2A
Resettable Fuse, Size 1812, 16V, 2A; Manufacturer: Littelfuse; Threshold Current: 40A; Trip Current: 4A; Supply 1 Name: Mouser; Supply 1 SN: 650-MINISMDC200F/162; Supply 2 Name: Digikey; Supply 2 SN: MINISMDC200F/16-2TR-ND; Supply 3 Name: Thegioiic; Threshold Voltage: 16V; Hold Current: 2A; Size: 1812; Mounting Technology: SMT/SMD; ComponentLink1Description: Datasheet link; ComponentLink1URL: https://www.littelfuse.com/~/media/electronics/product_specifications/resettable_ptcs/littelfuse_ptc_minismdc300f_2_product_specification.pdf.pdf; ComponentLink2Description: Supply 1 URL; ComponentLink2URL: https://www.mouser.vn/ProductDetail/Littelfuse/MINISMDC200F-16-2?qs=pBN%2FbMTRZdcH0yqkqvkPxw%3D%3D; ComponentLink3Description: Supply 2 URL; ComponentLink3URL: https://www.digikey.com/en/products/detail/littelfuse-inc/MINISMDC200F-16-2/6348163?s=N4IgTCBcDaILIEkByCDKcAiBhMAGXAYgPQCMAbALQQC6AvkA; ComponentLink4Description: Supply 3 URL; ComponentLink4URL: https://www.thegioiic.com/cau-chi-tu-phuc-hoi-1812-16v-2a; Supply 3 SN: N/A
footprint Fuse_SMD_1812 (Fuse SMD, size 1812)
pins: 0, 1

## 061812250016
designator F?, comment 16V, 2.5A
Resettable Fuse, Size 1812, 16V, 2.5A; Manufacturer: Bourns; Threshold Current: 100A; Trip Current: 5A; Supply 1 Name: Mouser; Supply 1 SN: 652-MF-MSMF250/16X-2; Supply 2 Name: Digikey; Supply 2 SN: MF-MSMF250/16X-2TR-ND; Supply 3 Name: Thegioiic; Supply 3 SN: MF-MSMF250/16; Threshold Voltage: 16V; Hold Current: 2.5A; Size: 1812; Mounting Technology: SMT/SMD; ComponentLink1Description: Datasheet link; ComponentLink1URL: https://www.bourns.com/docs/Product-Datasheets/mfnsmf.pdf; ComponentLink2Description: Supply 1 URL; ComponentLink2URL: https://www.mouser.vn/ProductDetail/Bourns/MF-MSMF250-16X-2?qs=9fn1gpisni78zr7pGyDhCQ%3D%3D; ComponentLink3Description: Supply 2 URL; ComponentLink3URL: https://www.digikey.com/en/products/detail/bourns-inc/MF-MSMF250-16X-2/2563289; ComponentLink4Description: Supply 3 URL; ComponentLink4URL: https://www.thegioiic.com/mf-msmf250-16-cau-chi-tu-phuc-hoi-1812-16v-2-5a
footprint Fuse_SMD_1812 (Fuse SMD, size 1812)
pins: 0, 1

## 061812300006
designator F?, comment 6V, 3A
Resettable Fuse, Size 1812, 6V, 3A; Manufacturer: Littelfuse; Threshold Current: 100A; Trip Current: 6A; Supply 1 Name: Mouser; Supply 1 SN: 650-MINISMDC300F-2; Supply 2 Name: Digikey; Supply 2 SN: MINISMDC300F-2TR-ND; Supply 3 Name: Thegioiic; Threshold Voltage: 6V; Hold Current: 3A; Size: 1812; Mounting Technology: SMT/SMD; ComponentLink1Description: Datasheet link; ComponentLink1URL: https://www.littelfuse.com/~/media/electronics/product_specifications/resettable_ptcs/littelfuse_ptc_minismdc300f_2_product_specification.pdf.pdf; ComponentLink2Description: Supply 1 URL; ComponentLink2URL: https://www.mouser.vn/ProductDetail/Littelfuse/MINISMDC300F-2?qs=NBx1VnXdadznR1WtAMXLew%3D%3D; ComponentLink3Description: Supply 2 URL; ComponentLink3URL: https://www.digikey.com/en/products/detail/littelfuse-inc/MINISMDC300F-2/3885071?s=N4IgjCBcoGwBwCYqgMZQGYEMA2BnApgDQgD2UA2iAMwAEAgiALrEAOALlCAKoB2AlmwDy6ALL5MuAK4AnfCAC%2BxeFWQg0kLHiKkKIGPSasOkbvyGjxU2QqVwYq9ZoLEykSghgB2ACwBWJMwg7JwAymzSfDwA5jYgCAAMnkjQahg4zjpu4PHxBoHBJrwCwmISMnKKcYm%2BDmlaLrpU%2BgC2ggAWzbiGQcamxRZl1vKVyZTokgRM8kA; ComponentLink4Description: Supply 3 URL; ComponentLink4URL: https://www.thegioiic.com/cau-chi-tu-phuc-hoi-1812-6v-3a; Supply 3 SN: N/A
footprint Fuse_SMD_1812 (Fuse SMD, size 1812)
pins: 0, 1